# Altium schematic symbol library ERA-2AED103X.SchLib: 1 symbol
Pins are listed as number, name and electrical type; pins without a type are passive.

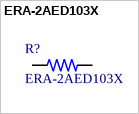
[diagram p0: symbol ERA-2AED103X]

## ERA-2AED103X
designator R?
Description; Manufacturer_Name: Panasonic; Copyright: Copyright (C) 2026 Ultra Librarian. All rights reserved.; Manufacturer_Part_Number: ERA-2AED103X
footprint RES_ERA2A_PAN
pins: 1, 2